# Altium footprint library Footprint.PcbLib: 411 footprints (part 16 of 26)
Each footprint in its own frame and in the unit in brackets; x right, y up, seen from the top. Pads: shape width x height; smd on the part's side, far side on the other; paste and mask are expansions set on the pad; w line width, h text height; cw(c..) or ccw(c..) is an arc to the next point about the centre after c.
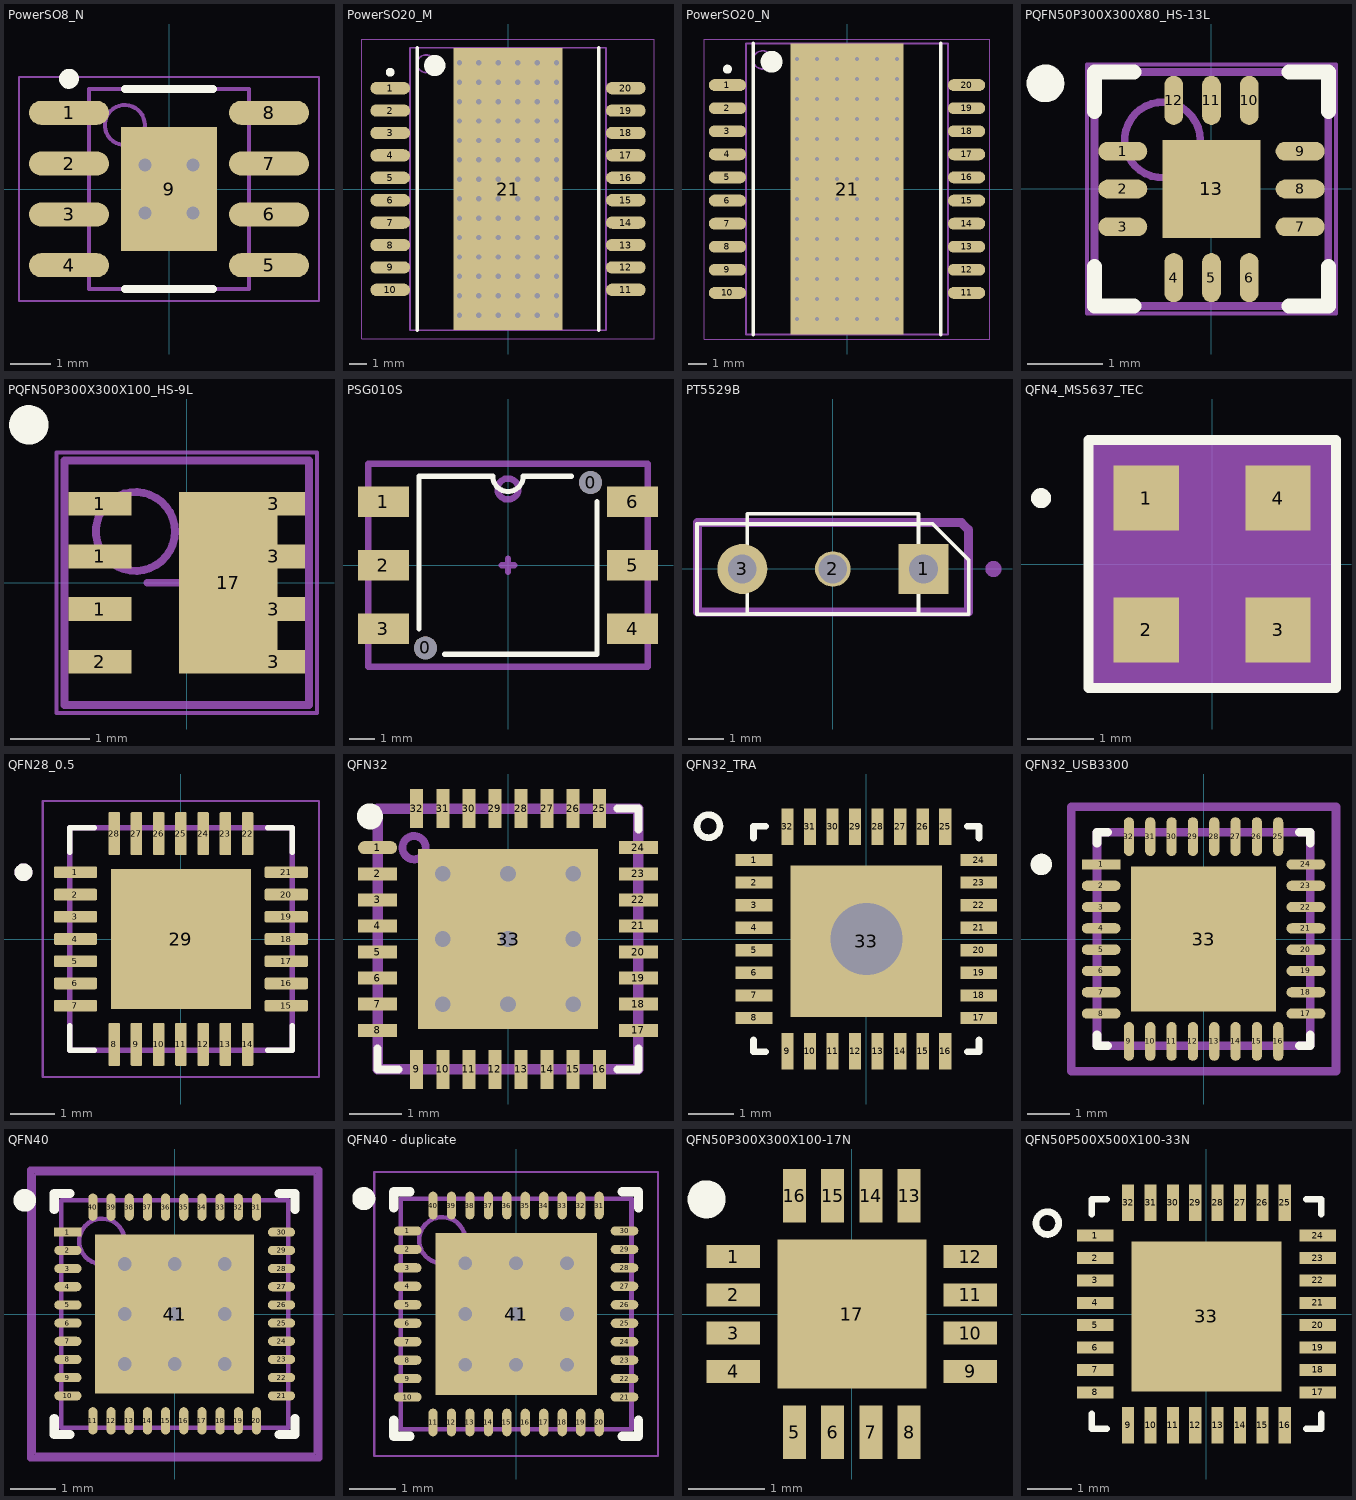
[diagram p15: the footprints below, top view; thin cyan lines are the x and y axes]

## PowerSO8_N [mm] "SOIC, 8-Leads, Body 4.9x3.9mm, Pitch 1.27mm, Exposed Pad, IPC Medium Density"
height 1.68
pads (9):
  oval 2x0.6 smd: 1(-2.5,1.905) 2(-2.5,0.635) 3(-2.5,-0.635) 4(-2.5,-1.905) 5(2.5,-1.905) 6(2.5,-0.635) 7(2.5,0.635) 8(2.5,1.905)
  rect 2.41x3.1 smd: 9(0,0)
via -0.6,-0.6 diameter 0.66 hole 0.33
via 0.6,-0.6 diameter 0.66 hole 0.33
via 0.6,0.6 diameter 0.66 hole 0.33
via -0.6,0.6 diameter 0.66 hole 0.33
Top Overlay:
  circle w0.25: c-2.5,2.755 r0.125
  lines w0.2: -1.1,-2.5 1.1,-2.5 ; -1.1,2.5 1.1,2.5
Mechanical 13:
  circle w0.1: c-1.105,1.6 r0.5
  lines w0.1: -2.005,-2.5 -2.005,2.5 2.005,2.5 2.005,-2.5 -2.005,-2.5
Mechanical 15:
  lines w0.05: -3.75,-2.8 -3.75,2.8 3.75,2.8 3.75,-2.8 -3.75,-2.8
  lines w0.1: -0.5,0 0.5,0 ; 0,-0.5 0,0.5
3D body: height 1.68, standoff 0.03, extent -2.005,-2.5 2.005,2.5

## PowerSO20_M [mm] "SOIC, 20-Leads, Body 16x11.1mm, Pitch 1.27mm, Thermal Pad 16x6.2mm, IPC Low Density"
height 3.6
pads (21):
  oval 2.25x0.7 smd: 1(-6.675,5.715) 2(-6.675,4.445) 3(-6.675,3.175) 4(-6.675,1.905) 5(-6.675,0.635) 6(-6.675,-0.635) 7(-6.675,-1.905) 8(-6.675,-3.175) 9(-6.675,-4.445) 10(-6.675,-5.715) 11(6.675,-5.715) 12(6.675,-4.445) 13(6.675,-3.175) 14(6.675,-1.905) 15(6.675,-0.635) 16(6.675,0.635) 17(6.675,1.905) 18(6.675,3.175) 19(6.675,4.445) 20(6.675,5.715)
  rect 6.2x16 smd: 21(0,0)
via -1.65,-7.15 diameter 0.6 hole 0.3
via -2.75,-7.15 diameter 0.6 hole 0.3
via -0.55,-7.15 diameter 0.6 hole 0.3
via 0.55,-7.15 diameter 0.6 hole 0.3
via 1.65,-7.15 diameter 0.6 hole 0.3
via 2.75,-7.15 diameter 0.6 hole 0.3
via -1.65,-6.05 diameter 0.6 hole 0.3
via -2.75,-6.05 diameter 0.6 hole 0.3
via -0.55,-6.05 diameter 0.6 hole 0.3
via 0.55,-6.05 diameter 0.6 hole 0.3
via 1.65,-6.05 diameter 0.6 hole 0.3
via 2.75,-6.05 diameter 0.6 hole 0.3
via -1.65,-4.95 diameter 0.6 hole 0.3
via -2.75,-4.95 diameter 0.6 hole 0.3
via -0.55,-4.95 diameter 0.6 hole 0.3
via 0.55,-4.95 diameter 0.6 hole 0.3
via 1.65,-4.95 diameter 0.6 hole 0.3
via 2.75,-4.95 diameter 0.6 hole 0.3
via -1.65,-3.85 diameter 0.6 hole 0.3
via -2.75,-3.85 diameter 0.6 hole 0.3
via -0.55,-3.85 diameter 0.6 hole 0.3
via 0.55,-3.85 diameter 0.6 hole 0.3
via 1.65,-3.85 diameter 0.6 hole 0.3
via 2.75,-3.85 diameter 0.6 hole 0.3
via -1.65,-2.75 diameter 0.6 hole 0.3
via -2.75,-2.75 diameter 0.6 hole 0.3
via -0.55,-2.75 diameter 0.6 hole 0.3
via 0.55,-2.75 diameter 0.6 hole 0.3
via 1.65,-2.75 diameter 0.6 hole 0.3
via 2.75,-2.75 diameter 0.6 hole 0.3
via -1.65,-1.65 diameter 0.6 hole 0.3
via -2.75,-1.65 diameter 0.6 hole 0.3
via -0.55,-1.65 diameter 0.6 hole 0.3
via 0.55,-1.65 diameter 0.6 hole 0.3
via 1.65,-1.65 diameter 0.6 hole 0.3
via 2.75,-1.65 diameter 0.6 hole 0.3
via -1.65,-0.55 diameter 0.6 hole 0.3
via -2.75,-0.55 diameter 0.6 hole 0.3
via -0.55,-0.55 diameter 0.6 hole 0.3
via 0.55,-0.55 diameter 0.6 hole 0.3
via 1.65,-0.55 diameter 0.6 hole 0.3
via 2.75,-0.55 diameter 0.6 hole 0.3
via -1.65,0.55 diameter 0.6 hole 0.3
via -2.75,0.55 diameter 0.6 hole 0.3
via -0.55,0.55 diameter 0.6 hole 0.3
via 0.55,0.55 diameter 0.6 hole 0.3
via 1.65,0.55 diameter 0.6 hole 0.3
via 2.75,0.55 diameter 0.6 hole 0.3
via -1.65,1.65 diameter 0.6 hole 0.3
via -2.75,1.65 diameter 0.6 hole 0.3
via -0.55,1.65 diameter 0.6 hole 0.3
via 0.55,1.65 diameter 0.6 hole 0.3
via 1.65,1.65 diameter 0.6 hole 0.3
via 2.75,1.65 diameter 0.6 hole 0.3
via -1.65,2.75 diameter 0.6 hole 0.3
via -2.75,2.75 diameter 0.6 hole 0.3
via -0.55,2.75 diameter 0.6 hole 0.3
via 0.55,2.75 diameter 0.6 hole 0.3
via 1.65,2.75 diameter 0.6 hole 0.3
via 2.75,2.75 diameter 0.6 hole 0.3
via -1.65,3.85 diameter 0.6 hole 0.3
via -2.75,3.85 diameter 0.6 hole 0.3
via -0.55,3.85 diameter 0.6 hole 0.3
via 0.55,3.85 diameter 0.6 hole 0.3
via 1.65,3.85 diameter 0.6 hole 0.3
via 2.75,3.85 diameter 0.6 hole 0.3
via -1.65,4.95 diameter 0.6 hole 0.3
via -2.75,4.95 diameter 0.6 hole 0.3
via -0.55,4.95 diameter 0.6 hole 0.3
via 0.55,4.95 diameter 0.6 hole 0.3
via 1.65,4.95 diameter 0.6 hole 0.3
via 2.75,4.95 diameter 0.6 hole 0.3
via 2.75,6.05 diameter 0.6 hole 0.3
via 1.65,6.05 diameter 0.6 hole 0.3
via 0.55,6.05 diameter 0.6 hole 0.3
via -0.55,6.05 diameter 0.6 hole 0.3
via 2.75,7.15 diameter 0.6 hole 0.3
via 1.65,7.15 diameter 0.6 hole 0.3
via 0.55,7.15 diameter 0.6 hole 0.3
via -0.55,7.15 diameter 0.6 hole 0.3
via -2.75,7.15 diameter 0.6 hole 0.3
via -1.65,7.15 diameter 0.6 hole 0.3
via -2.75,6.05 diameter 0.6 hole 0.3
via -1.65,6.05 diameter 0.6 hole 0.3
Top Overlay:
  circle w0.25: c-6.675,6.615 r0.125
  circle w0.6: c-4.15,7 r0.3
  lines w0.2: -5.15,-8 -5.15,8 ; 5.15,-8 5.15,8
Mechanical 13:
  circle w0.1: c-4.65,7.1 r0.5
  lines w0.1: -5.55,-8 -5.55,8 5.55,8 5.55,-8 -5.55,-8
Mechanical 15:
  lines w0.05: -8.3,-8.5 -8.3,8.5 8.3,8.5 8.3,-8.5 -8.3,-8.5
3D body "SOIC127P1420X360_HS-21M.step": height 3.6, standoff 0, extent -7.1,-8 7.1,8

## PowerSO20_N [mm] "SOIC, 20-Leads, Body 16x11.1mm, Pitch 1.27mm, Thermal Pad 16x6.2mm, IPC Medium Density"
height 3.6
pads (21):
  oval 2.05x0.65 smd: 1(-6.575,5.715) 2(-6.575,4.445) 3(-6.575,3.175) 4(-6.575,1.905) 5(-6.575,0.635) 6(-6.575,-0.635) 7(-6.575,-1.905) 8(-6.575,-3.175) 9(-6.575,-4.445) 10(-6.575,-5.715) 11(6.575,-5.715) 12(6.575,-4.445) 13(6.575,-3.175) 14(6.575,-1.905) 15(6.575,-0.635) 16(6.575,0.635) 17(6.575,1.905) 18(6.575,3.175) 19(6.575,4.445) 20(6.575,5.715)
  rect 6.2x16 smd: 21(0,0)
via 2.75,-7.15 diameter 0.5 hole 0.2
via 1.65,-7.15 diameter 0.5 hole 0.2
via 0.55,-7.15 diameter 0.5 hole 0.2
via -0.55,-7.15 diameter 0.5 hole 0.2
via -1.65,-7.15 diameter 0.5 hole 0.2
via -2.75,-7.15 diameter 0.5 hole 0.2
via 2.75,-6.05 diameter 0.5 hole 0.2
via 1.65,-6.05 diameter 0.5 hole 0.2
via 0.55,-6.05 diameter 0.5 hole 0.2
via -0.55,-6.05 diameter 0.5 hole 0.2
via -1.65,-6.05 diameter 0.5 hole 0.2
via -2.75,-6.05 diameter 0.5 hole 0.2
via 2.75,-4.95 diameter 0.5 hole 0.2
via 1.65,-4.95 diameter 0.5 hole 0.2
via 0.55,-4.95 diameter 0.5 hole 0.2
via -0.55,-4.95 diameter 0.5 hole 0.2
via -1.65,-4.95 diameter 0.5 hole 0.2
via -2.75,-4.95 diameter 0.5 hole 0.2
via 2.75,-3.85 diameter 0.5 hole 0.2
via 1.65,-3.85 diameter 0.5 hole 0.2
via 0.55,-3.85 diameter 0.5 hole 0.2
via -0.55,-3.85 diameter 0.5 hole 0.2
via -1.65,-3.85 diameter 0.5 hole 0.2
via -2.75,-3.85 diameter 0.5 hole 0.2
via 2.75,-2.75 diameter 0.5 hole 0.2
via 1.65,-2.75 diameter 0.5 hole 0.2
via 0.55,-2.75 diameter 0.5 hole 0.2
via -0.55,-2.75 diameter 0.5 hole 0.2
via -1.65,-2.75 diameter 0.5 hole 0.2
via -2.75,-2.75 diameter 0.5 hole 0.2
via 2.75,-1.65 diameter 0.5 hole 0.2
via 1.65,-1.65 diameter 0.5 hole 0.2
via 0.55,-1.65 diameter 0.5 hole 0.2
via -0.55,-1.65 diameter 0.5 hole 0.2
via -1.65,-1.65 diameter 0.5 hole 0.2
via -2.75,-1.65 diameter 0.5 hole 0.2
via 2.75,-0.55 diameter 0.5 hole 0.2
via 1.65,-0.55 diameter 0.5 hole 0.2
via 0.55,-0.55 diameter 0.5 hole 0.2
via -0.55,-0.55 diameter 0.5 hole 0.2
via -1.65,-0.55 diameter 0.5 hole 0.2
via -2.75,-0.55 diameter 0.5 hole 0.2
via 2.75,0.55 diameter 0.5 hole 0.2
via 1.65,0.55 diameter 0.5 hole 0.2
via 0.55,0.55 diameter 0.5 hole 0.2
via -0.55,0.55 diameter 0.5 hole 0.2
via -1.65,0.55 diameter 0.5 hole 0.2
via -2.75,0.55 diameter 0.5 hole 0.2
via 2.75,1.65 diameter 0.5 hole 0.2
via 1.65,1.65 diameter 0.5 hole 0.2
via 0.55,1.65 diameter 0.5 hole 0.2
via -0.55,1.65 diameter 0.5 hole 0.2
via -1.65,1.65 diameter 0.5 hole 0.2
via -2.75,1.65 diameter 0.5 hole 0.2
via 2.75,2.75 diameter 0.5 hole 0.2
via 1.65,2.75 diameter 0.5 hole 0.2
via 0.55,2.75 diameter 0.5 hole 0.2
via -0.55,2.75 diameter 0.5 hole 0.2
via -1.65,2.75 diameter 0.5 hole 0.2
via -2.75,2.75 diameter 0.5 hole 0.2
via 2.75,3.85 diameter 0.5 hole 0.2
via 1.65,3.85 diameter 0.5 hole 0.2
via 0.55,3.85 diameter 0.5 hole 0.2
via -0.55,3.85 diameter 0.5 hole 0.2
via -1.65,3.85 diameter 0.5 hole 0.2
via -2.75,3.85 diameter 0.5 hole 0.2
via 2.75,4.95 diameter 0.5 hole 0.2
via 1.65,4.95 diameter 0.5 hole 0.2
via 0.55,4.95 diameter 0.5 hole 0.2
via -0.55,4.95 diameter 0.5 hole 0.2
via -1.65,4.95 diameter 0.5 hole 0.2
via -2.75,4.95 diameter 0.5 hole 0.2
via 2.75,6.05 diameter 0.5 hole 0.2
via 1.65,6.05 diameter 0.5 hole 0.2
via 0.55,6.05 diameter 0.5 hole 0.2
via -0.55,6.05 diameter 0.5 hole 0.2
via -1.65,6.05 diameter 0.5 hole 0.2
via -2.75,6.05 diameter 0.5 hole 0.2
via 2.75,7.15 diameter 0.5 hole 0.2
via 1.65,7.15 diameter 0.5 hole 0.2
via 0.55,7.15 diameter 0.5 hole 0.2
via -0.55,7.15 diameter 0.5 hole 0.2
via -1.65,7.15 diameter 0.5 hole 0.2
via -2.75,7.15 diameter 0.5 hole 0.2
Top Overlay:
  circle w0.6: c-4.15,7 r0.3
  circle w0.25: c-6.575,6.59 r0.125
  lines w0.2: -5.15,-8 -5.15,8 ; 5.15,-8 5.15,8
Mechanical 13:
  circle w0.1: c-4.65,7.1 r0.5
  lines w0.1: -5.55,-8 5.55,-8 5.55,8 -5.55,8 -5.55,-8
Mechanical 15:
  lines w0.05: -7.85,-8.25 7.85,-8.25 7.85,8.25 -7.85,8.25 -7.85,-8.25
  lines w0.1: -0.5,0 0.5,0 ; 0,-0.5 0,0.5
3D body "SOIC127P1420X360_HS-21N.step": height 3.6, standoff 0, extent -7.1,-8 7.1,8

## PQFN50P300X300X80_HS-13L [mm] "PQFN, 12-Leads, Body 3,00x3,00mm, Pitch 0,50mm, Thermal Pad 1,30x1,30mm, IPC High Density"
height 0.8
pads (13):
  oval 0.65x0.25 smd: 1(-1.175,0.5) 2(-1.175,0) 3(-1.175,-0.5) 7(1.175,-0.5) 8(1.175,0) 9(1.175,0.5)
  oval 0.25x0.65 smd: 4(-0.5,-1.175) 5(0,-1.175) 6(0.5,-1.175) 10(0.5,1.175) 11(0,1.175) 12(-0.5,1.175)
  rect 1.3x1.3 smd: 13(0,0)
Top Overlay:
  circle w0.25: c-2.2,1.4 r0.125
  lines w0.2: -1.55,-1.025 -1.55,-1.55 -1.025,-1.55 ; -1.55,1.025 -1.55,1.55 -1.025,1.55 ; 1.025,-1.55 1.55,-1.55 1.55,-1.025 ; 1.025,1.55 1.55,1.55 1.55,1.025
Assembly Top:
  circle w0.1: c-0.65,0.65 r0.5
  lines w0.1: -1.55,-1.55 1.55,-1.55 1.55,1.55 -1.55,1.55 -1.55,-1.55
Courtyard Top:
  lines w0.05: -1.65,-1.65 1.65,-1.65 1.65,1.65 -1.65,1.65 -1.65,-1.65
  lines w0.1: -0.5,0 0.5,0 ; 0,-0.5 0,0.5
3D body "PQFN50P300X300X80_HS-13L.step": height 0.8, standoff 0, extent -1.55,-1.55 1.55,1.55

## PQFN50P300X300X100_HS-9L [mm] "PQFN, 8-Leads, Body 3.00x3.00mm, Pitch 0.50mm/0.67mm, Thermal Pad 1.25x2.30mm, IPC High Density"
height 1
pads (17):
  rect 0.8x0.3 smd: 1(-1.1,-0.333) 1(-1.1,0.333) 1(-1.1,0.999) 2(-1.1,-0.999) 3(1.1,-0.999) 3(1.1,-0.333) 3(1.1,0.333) 3(1.1,0.999)
  rect 0x0 smd: 9(0,0) 10(0,0) 11(0,0) 12(0,0) 13(0,0) 14(0,0) 15(0,0) 16(0,0)
  rect 1.25x2.3 smd: 17(0.525,0)
Top Overlay:
  circle w0.25: c-2,2 r0.125
Mechanical 13:
  circle w0.1: c-0.65,0.65 r0.5
  lines w0.1: -1.55,-1.55 -1.55,1.55 1.55,1.55 1.55,-1.55 -1.55,-1.55
Mechanical 15:
  circle w0.254: c-2,2 r0.1
  lines w0.05: -1.65,-1.65 -1.65,1.65 1.65,1.65 1.65,-1.65 -1.65,-1.65
  lines w0.1: -0.5,0 0.5,0 ; 0,-0.5 0,0.5
  text ".Designator" at -1.65,1.65 h1.52
3D body "PQFN50P300X300X100_HS-9L.step": height 1, standoff 0, extent -1.55,-1.55 1.55,1.55

## PSG010S [mm]
pads (8):
  round 0.9 hole 0.9 unplated: 0(-3.25,-3.25) 0(3.25,3.25)
  rect 2x1.2 smd: 1(-4.9,2.5) 2(-4.9,0) 3(-4.9,-2.5) 4(4.9,-2.5) 5(4.9,0) 6(4.9,2.5)
Top Overlay:
  lines w0.2: -3.5,-2.5 -3.5,3.5 -0.6,3.5 ; -2.5,-3.5 3.5,-3.5 3.5,2.5 ; 2.5,3.5 0.6,3.5 ; -0.6,3.5 ccw(c0,3.5) 0.6,3.5 ; -0.6,3.5 ccw(c0,3.5) 0.6,3.5
Mechanical 15:
  circle w0.254: c0,3 r0.412
  lines w0.254: -5.5,-4 -5.5,4 5.5,4 5.5,-4 -5.5,-4 ; -0.254,0 0.254,0 -0.254,0 ; 0,-0.254 0,0.254 0,-0.254
  text ".Designator" at -2.4,-4.9 h1.52
3D body "PSG010S.STEP": height 9.6, standoff -0.4, extent -5.138,-3.51 5.162,3.49

## PT5529B [mm]
pads (3):
  rect 1.4x1.4 hole 0.8: 1(2.54,0)
  round 1 hole 0.8: 2(0,0)
  round 1.4 hole 0.8: 3(-2.54,0)
Top Overlay:
  lines w0.1: -2.4,1.25 2.4,1.25 ; -3.81,-1.27 3.81,-1.27 3.81,0.254 2.794,1.27 -3.81,1.27 -3.81,-1.27 ; -2.4,-1.25 2.4,-1.25 2.4,1.55 -2.4,1.55 -2.4,-1.25
Mechanical 15:
  circle w0.254: c4.5,0 r0.1
  lines w0.254: -3.8,-1.2 3.8,-1.2 3.8,1.1 3.6,1.3 -3.8,1.3 -3.8,-1.2
  text ".Designator" at -2.9,-2.1 h1.52

## QFN4_MS5637_TEC [mm]
pads (4):
  rect 0.991x0.991 smd paste-0.495 mask+0: 1(-1,1) 2(-1,-1) 3(1,-1) 4(1,1)
Top Overlay:
  circle w0.152: c-2.597,1 r0.076
  lines w0.152: -1.88,-1.88 -1.88,1.88 1.88,1.88 1.88,-1.88 -1.88,-1.88
Top Paste:
  region: -0.505,1.495 -1.495,1.495 -1.495,0.505 -0.505,0.505
  region: -0.505,-0.505 -1.495,-0.505 -1.495,-1.495 -0.505,-1.495
  region: 1.495,-0.505 0.505,-0.505 0.505,-1.495 1.495,-1.495
  region: 1.495,1.495 0.505,1.495 0.505,0.505 1.495,0.505
Top Solder:
  region: -0.505,1.495 -1.495,1.495 -1.495,0.505 -0.505,0.505
  region: -0.505,-0.505 -1.495,-0.505 -1.495,-1.495 -0.505,-1.495
  region: 1.495,-0.505 0.505,-0.505 0.505,-1.495 1.495,-1.495
  region: 1.495,1.495 0.505,1.495 0.505,0.505 1.495,0.505
Assembly Bottom:
  region: 1.876,-1.88 -1.876,-1.88 -1.876,1.88 1.876,1.88
Mechanical 13:
  circle w0: c-0.254,1.016 r0.076
  lines w0: -0.305,1.499 ccw(c0,1.499) 0.305,1.499
  lines w0.025: -1.499,-1.499 1.499,-1.499 1.499,1.499 -1.499,1.499 -1.499,-1.499
Mechanical 15:
  region: 1.753,1.753 -1.753,1.753 -1.753,-1.753 1.753,-1.753
  lines w0.152: -1.753,-1.753 -1.753,1.753 1.753,1.753 1.753,-1.753 -1.753,-1.753
3D body "c-ms583730ba01-50-1-3d.stp": height 2.75, standoff 0.01, extent -1.65,-1.65 1.65,1.65

## QFN28_0.5 [mm]
pads (29):
  rrect25% 0.97x0.26 smd: 1(-2.37,1.5) 2(-2.37,1) 3(-2.37,0.5) 4(-2.37,0) 5(-2.37,-0.5) 6(-2.37,-1) 7(-2.37,-1.5) 15(2.37,-1.5) 16(2.37,-1) 17(2.37,-0.5) 18(2.37,0) 19(2.37,0.5) 20(2.37,1) 21(2.37,1.5)
  rrect25% 0.26x0.97 smd: 8(-1.5,-2.37) 9(-1,-2.37) 10(-0.5,-2.37) 11(0,-2.37) 12(0.5,-2.37) 13(1,-2.37) 14(1.5,-2.37) 22(1.5,2.37) 23(1,2.37) 24(0.5,2.37) 25(0,2.37) 26(-0.5,2.37) 27(-1,2.37) 28(-1.5,2.37)
  rect 3.15x3.15 smd paste-3: 29(0,0)
Top Overlay:
  circle w0.2: c-3.54,1.5 r0.1
  lines w0.127: -2.5,-1.95 -2.5,-2.5 -1.95,-2.5 ; -2.5,1.95 -2.5,2.5 -1.95,2.5 ; 1.95,-2.5 2.5,-2.5 2.5,-1.95 ; 1.95,2.5 2.5,2.5 2.5,1.95
Top Paste:
  region: 1,-1 -1,-1 -1,1 1,1
Mechanical 13:
  circle w0.2: c-3.54,1.5 r0.1
  lines w0.127: -2.5,-2.5 -2.5,2.5 2.5,2.5 2.5,-2.5 -2.5,-2.5
Mechanical 15:
  lines w0.05: -3.105,-3.105 -3.105,3.105 3.105,3.105 3.105,-3.105 -3.105,-3.105
3D body "QFN28_5X5_SIL.step": height 0.99, standoff 0, extent -2.502,-2.502 2.502,2.502

## QFN32 [mm]
pads (33):
  oval 0.75x0.25 smd: 1(-2.5,1.75)
  rect 0.75x0.25 smd: 2(-2.5,1.25) 3(-2.5,0.75) 4(-2.5,0.25) 5(-2.5,-0.25) 6(-2.5,-0.75) 7(-2.5,-1.25) 8(-2.5,-1.75) 17(2.5,-1.75) 18(2.5,-1.25) 19(2.5,-0.75) 20(2.5,-0.25) 21(2.5,0.25) 22(2.5,0.75) 23(2.5,1.25) 24(2.5,1.75)
  rect 0.25x0.75 smd: 9(-1.75,-2.5) 10(-1.25,-2.5) 11(-0.75,-2.5) 12(-0.25,-2.5) 13(0.25,-2.5) 14(0.75,-2.5) 15(1.25,-2.5) 16(1.75,-2.5) 25(1.75,2.5) 26(1.25,2.5) 27(0.75,2.5) 28(0.25,2.5) 29(-0.25,2.5) 30(-0.75,2.5) 31(-1.25,2.5) 32(-1.75,2.5)
  rect 3.45x3.45 smd: 33(0,0)
via 0,1.25 diameter 0.6 hole 0.3
via -1.25,1.25 diameter 0.6 hole 0.3
via 1.25,0 diameter 0.6 hole 0.3
via 0,0 diameter 0.6 hole 0.3
via -1.25,0 diameter 0.6 hole 0.3
via 1.25,1.25 diameter 0.6 hole 0.3
via 1.25,-1.25 diameter 0.6 hole 0.3
via 0,-1.25 diameter 0.6 hole 0.3
via -1.25,-1.25 diameter 0.6 hole 0.3
Top Overlay:
  circle w0.25: c-2.645,2.35 r0.125
  lines w0.15: -2.5,-2.1 -2.5,-2.5 -2.1,-2.5 ; 2.1,-2.5 2.5,-2.5 2.5,-2.1 ; 2.1,2.5 2.5,2.5 2.5,2.1
Mechanical 1:
  circle w0.15: c-1.8,1.75 r0.224
  lines w0.2: -2.5,-2.5 -2.5,2.5 2.5,2.5 2.5,-2.5 -2.5,-2.5
3D body "User Library-qfn32-5x5.step": height 0.83, standoff 0.03, extent -2.51,-2.51 2.51,2.51

## QFN32_TRA [mil]
pads (33):
  rect 32x10.63 smd: 1(-98,68.9) 2(-98,49.21) 3(-98,29.53) 4(-98,9.84) 5(-98,-9.84) 6(-98,-29.53) 7(-98,-49.21) 8(-98,-68.9) 17(98,-68.9) 18(98,-49.21) 19(98,-29.53) 20(98,-9.84) 21(98,9.84) 22(98,29.53) 23(98,49.21) 24(98,68.9)
  rect 10.63x32 smd: 9(-68.9,-98) 10(-49.21,-98) 11(-29.53,-98) 12(-9.84,-98) 13(9.84,-98) 14(29.53,-98) 15(49.21,-98) 16(68.9,-98) 25(68.9,98) 26(49.21,98) 27(29.53,98) 28(9.84,98) 29(-9.84,98) 30(-29.53,98) 31(-49.21,98) 32(-68.9,98)
  rect 132x132 smd: 33(0,-2)
via 0,0 diameter 86.61 hole 62.99
Top Overlay:
  circle w5.91: c-137.8,98.43 r10
  lines w6: -98.43,-88 -98.43,-98.43 -88,-98.43 ; -98.43,88 -98.43,98.43 -88,98.43 ; 88,-98.43 98.43,-98.43 98.43,-88 ; 88,98.43 98.43,98.43 98.43,88

## QFN32_USB3300 [mm]
pads (33):
  rect 0.91x0.239 smd paste+0 mask+0: 1(-2.401,1.75)
  rrect100% 0.91x0.239 smd paste+0 mask+0: 2(-2.401,1.25) 3(-2.401,0.75) 4(-2.401,0.25) 5(-2.401,-0.25) 6(-2.401,-0.75) 7(-2.401,-1.25) 8(-2.401,-1.75) 17(2.401,-1.75) 18(2.401,-1.25) 19(2.401,-0.75) 20(2.401,-0.25) 21(2.401,0.25) 22(2.401,0.75) 23(2.401,1.25) 24(2.401,1.75)
  rrect100% 0.239x0.91 smd paste+0 mask+0: 9(-1.75,-2.401) 10(-1.25,-2.401) 11(-0.75,-2.401) 12(-0.25,-2.401) 13(0.25,-2.401) 14(0.75,-2.401) 15(1.25,-2.401) 16(1.75,-2.401) 25(1.75,2.401) 26(1.25,2.401) 27(0.75,2.401) 28(0.25,2.401) 29(-0.25,2.401) 30(-0.75,2.401) 31(-1.25,2.401) 32(-1.75,2.401)
  rect 3.4x3.4 smd paste-1000 mask+0: 33(0,0)
Top Overlay:
  circle w0.25: c-3.806,1.75 r0.125
  lines w0.2: -2.5,-2.25 -2.5,-2.5 -2.25,-2.5 ; -2.5,2.25 -2.5,2.5 -2.25,2.5 ; 2.25,-2.5 2.5,-2.5 2.5,-2.25 ; 2.25,2.5 2.5,2.5 2.5,2.25
Top Paste:
  rectangle: -1.075,-1.075 1.075,1.075
Assembly Top:
  lines w0.2: -3.106,-3.106 3.106,-3.106 3.106,3.106 -3.106,3.106 -3.106,-3.106
  text ".Designator" at 0,0.188 h1
Courtyard Top:
  lines w0.2: -3.106,-3.106 3.106,-3.106 3.106,3.106 -3.106,3.106 -3.106,-3.106
3D Body Top:
  lines w0.2: -2.5,-2.5 2.5,-2.5 2.5,2.5 -2.5,2.5 -2.5,-2.5
Top Component Center:
  lines w0.1: -0.5,0 0.5,0 ; 0,-0.5 0,0.5
3D body "IC_Microchip_USB3300-EZK-TR_eec.STEP": height 0.25, standoff 0, extent -3.106,-3.106 3.106,3.106

## QFN40 [mm] "5x5mm pitch 0.4"
height 0.9
pads (41):
  rect 0.6x0.2 smd: 1(-2.35,1.8)
  oval 0.6x0.2 smd: 2(-2.35,1.4) 3(-2.35,1) 4(-2.35,0.6) 5(-2.35,0.2) 6(-2.35,-0.2) 7(-2.35,-0.6) 8(-2.35,-1) 9(-2.35,-1.4) 10(-2.35,-1.8) 21(2.35,-1.8) 22(2.35,-1.4) 23(2.35,-1) 24(2.35,-0.6) 25(2.35,-0.2) 26(2.35,0.2) 27(2.35,0.6) 28(2.35,1) 29(2.35,1.4) 30(2.35,1.8)
  oval 0.2x0.6 smd: 11(-1.8,-2.35) 12(-1.4,-2.35) 13(-1,-2.35) 14(-0.6,-2.35) 15(-0.2,-2.35) 16(0.2,-2.35) 17(0.6,-2.35) 18(1,-2.35) 19(1.4,-2.35) 20(1.8,-2.35) 31(1.8,2.35) 32(1.4,2.35) 33(1,2.35) 34(0.6,2.35) 35(0.2,2.35) 36(-0.2,2.35) 37(-0.6,2.35) 38(-1,2.35) 39(-1.4,2.35) 40(-1.8,2.35)
  rect 3.5x3.5 smd: 41(0,0)
via -1.1,1.1 diameter 0.6 hole 0.3
via 0,1.1 diameter 0.6 hole 0.3
via 1.1,1.1 diameter 0.6 hole 0.3
via -1.1,0 diameter 0.6 hole 0.3
via 0,0 diameter 0.6 hole 0.3
via 1.1,0 diameter 0.6 hole 0.3
via -1.1,-1.1 diameter 0.6 hole 0.3
via 0,-1.1 diameter 0.6 hole 0.3
via 1.1,-1.1 diameter 0.6 hole 0.3
Top Overlay:
  circle w0.25: c-3.3,2.5 r0.125
  lines w0.2: -2.65,-2.3 -2.65,-2.65 -2.3,-2.65 ; -2.65,2.3 -2.65,2.65 -2.3,2.65 ; 2.3,-2.65 2.65,-2.65 2.65,-2.3 ; 2.3,2.65 2.65,2.65 2.65,2.3
Courtyard Top:
  lines w0.15: -3.175,-3.175 -3.175,3.175 3.175,3.175 3.175,-3.175 -3.175,-3.175
3D Body Top:
  circle w0.1: c-1.6,1.6 r0.5
  lines w0.1: -2.5,-2.5 -2.5,2.5 2.5,2.5 2.5,-2.5 -2.5,-2.5
Mechanical 15:
  lines w0.05: -3.075,-3.075 -3.075,3.075 3.075,3.075 3.075,-3.075 -3.075,-3.075
  lines w0.1: -0.5,0 0.5,0 ; 0,-0.5 0,0.5
3D body "User Library-QFN 40 5x5 pitch 0_4_STEP.step": height 0.64, standoff 0, extent -2.51,-2.51 2.51,2.51

## QFN40 - duplicate [mm] "5x5mm pitch 0.4"
height 0.9
pads (41):
  oval 0.6x0.2 smd: 1(-2.35,1.8) 2(-2.35,1.4) 3(-2.35,1) 4(-2.35,0.6) 5(-2.35,0.2) 6(-2.35,-0.2) 7(-2.35,-0.6) 8(-2.35,-1) 9(-2.35,-1.4) 10(-2.35,-1.8) 21(2.35,-1.8) 22(2.35,-1.4) 23(2.35,-1) 24(2.35,-0.6) 25(2.35,-0.2) 26(2.35,0.2) 27(2.35,0.6) 28(2.35,1) 29(2.35,1.4) 30(2.35,1.8)
  oval 0.2x0.6 smd: 11(-1.8,-2.35) 12(-1.4,-2.35) 13(-1,-2.35) 14(-0.6,-2.35) 15(-0.2,-2.35) 16(0.2,-2.35) 17(0.6,-2.35) 18(1,-2.35) 19(1.4,-2.35) 20(1.8,-2.35) 31(1.8,2.35) 32(1.4,2.35) 33(1,2.35) 34(0.6,2.35) 35(0.2,2.35) 36(-0.2,2.35) 37(-0.6,2.35) 38(-1,2.35) 39(-1.4,2.35) 40(-1.8,2.35)
  rect 3.5x3.5 smd: 41(0,0)
via -1.1,1.1 diameter 0.6 hole 0.3
via 0,1.1 diameter 0.6 hole 0.3
via 1.1,1.1 diameter 0.6 hole 0.3
via -1.1,0 diameter 0.6 hole 0.3
via 0,0 diameter 0.6 hole 0.3
via 1.1,0 diameter 0.6 hole 0.3
via -1.1,-1.1 diameter 0.6 hole 0.3
via 0,-1.1 diameter 0.6 hole 0.3
via 1.1,-1.1 diameter 0.6 hole 0.3
Top Overlay:
  circle w0.25: c-3.3,2.5 r0.125
  lines w0.2: -2.65,-2.3 -2.65,-2.65 -2.3,-2.65 ; -2.65,2.3 -2.65,2.65 -2.3,2.65 ; 2.3,-2.65 2.65,-2.65 2.65,-2.3 ; 2.3,2.65 2.65,2.65 2.65,2.3
Mechanical 13:
  circle w0.1: c-1.6,1.6 r0.5
  lines w0.1: -2.5,-2.5 -2.5,2.5 2.5,2.5 2.5,-2.5 -2.5,-2.5
Mechanical 15:
  lines w0.05: -3.075,-3.075 -3.075,3.075 3.075,3.075 3.075,-3.075 -3.075,-3.075
  lines w0.1: -0.5,0 0.5,0 ; 0,-0.5 0,0.5
3D body: height 0.9, standoff 0, extent -2.752,-2.752 2.752,2.752
3D body: height 0.9, standoff 0, extent -2.55,-2.55 2.55,2.55
3D body: height 0.9, standoff 0, extent -2.499,-2.499 2.499,2.499
3D body: height 0.9, standoff 0, extent -3.1,-3.1 3.1,3.1
3D body: height 0.9, standoff 0, extent -2.099,1.101 -1.101,2.099
3D body "QFN127P600-8N.step": height 0.9, standoff 0, extent -2.7,-2.7 2.7,2.7

## QFN50P300X300X100-17N [mm]
pads (17):
  rect 0.7x0.3 smd: 1(-1.55,0.75) 2(-1.55,0.25) 3(-1.55,-0.25) 4(-1.55,-0.75) 9(1.55,-0.75) 10(1.55,-0.25) 11(1.55,0.25) 12(1.55,0.75)
  rect 0.3x0.7 smd: 5(-0.75,-1.55) 6(-0.25,-1.55) 7(0.25,-1.55) 8(0.75,-1.55) 13(0.75,1.55) 14(0.25,1.55) 15(-0.25,1.55) 16(-0.75,1.55)
  rect 1.95x1.95 smd: 17(0,0)
Top Overlay:
  circle w0.25: c-1.9,1.5 r0.125
3D body "HMC1060LP3E.stp": height 1, standoff 0, extent -1.55,-1.55 1.55,1.55

## QFN50P500X500X100-33N [mil]
pads (33):
  rect 32x10.63 smd: 1(-98,68.9) 2(-98,49.21) 3(-98,29.53) 4(-98,9.84) 5(-98,-9.84) 6(-98,-29.53) 7(-98,-49.21) 8(-98,-68.9) 17(98,-68.9) 18(98,-49.21) 19(98,-29.53) 20(98,-9.84) 21(98,9.84) 22(98,29.53) 23(98,49.21) 24(98,68.9)
  rect 10.63x32 smd: 9(-68.9,-98) 10(-49.21,-98) 11(-29.53,-98) 12(-9.84,-98) 13(9.84,-98) 14(29.53,-98) 15(49.21,-98) 16(68.9,-98) 25(68.9,98) 26(49.21,98) 27(29.53,98) 28(9.84,98) 29(-9.84,98) 30(-29.53,98) 31(-49.21,98) 32(-68.9,98)
  rect 132x132 smd: 33(0,-2)
Top Overlay:
  circle w5.91: c-140,80 r10
  lines w6: -101,-88 -101,-101 -88,-101 ; -101,88 -101,101 -88,101 ; 88,-101 101,-101 101,-88 ; 88,101 101,101 101,88